# Altium schematic symbol library CDSOD323-T36SC.SchLib: 1 symbol
Pins are listed as number, name and electrical type; pins without a type are passive.

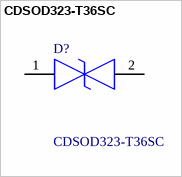
[diagram p0: symbol CDSOD323-T36SC]

## CDSOD323-T36SC
designator D?
BOURNS - CDSOD323-T36SC - DIODE, TVS, BI, 500W, 36V, SOD-323; Geometry.Height: 1.14mm; Mouser Part Number: 652-CDSOD323-T36SC; Mouser Price/Stock: https://www.mouser.co.uk/ProductDetail/Bourns/CDSOD323-T36SC?qs=oyIm%2F3giSj6DNSRMtrXOsA%3D%3D; Manufacturer_Name: Bourns; Manufacturer_Part_Number: CDSOD323-T36SC; Datasheet Link: https://www.bourns.com/docs/Product-Datasheets/CDSOD323-TxxSC.pdf
footprint SOD2513X114N
pins: 1, 2